# Altium footprint library E18系列-PcbLib.PcbLib: 4 footprints
Each footprint in its own frame and in the unit in brackets; x right, y up, seen from the top. Pads: shape width x height; smd on the part's side, far side on the other; paste and mask are expansions set on the pad; w line width, h text height; cw(c..) or ccw(c..) is an arc to the next point about the centre after c.
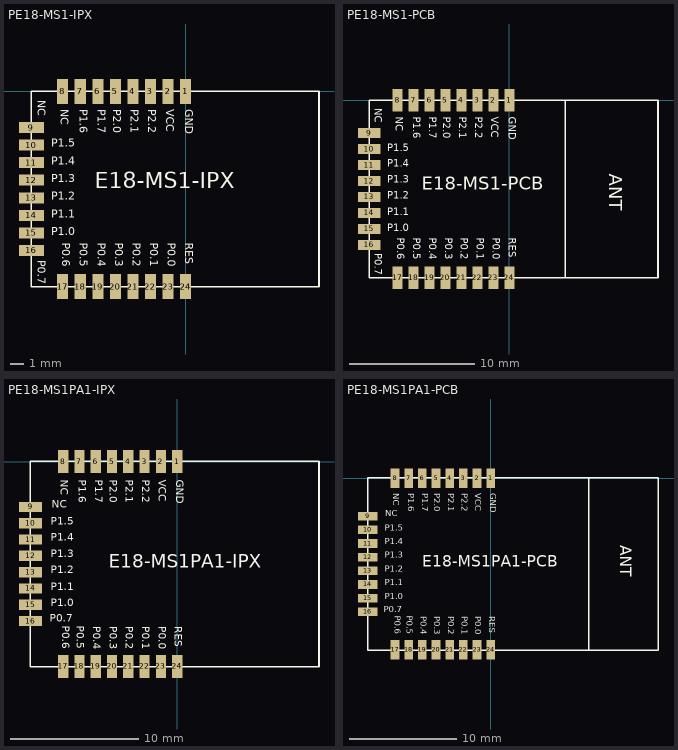
[diagram p0: the footprints below, top view; thin cyan lines are the x and y axes]

## PE18-MS1-IPX [mm] "20.8mm*14.1mm*2.40mm-S"
pads (24):
  rect 0.8x1.8 smd: 1(0,0) 2(-1.27,0) 3(-2.54,0) 4(-3.81,0) 5(-5.08,0) 6(-6.35,0) 7(-7.62,0) 8(-8.89,0) 17(-8.89,-14.114) 18(-7.62,-14.114) 19(-6.35,-14.114) 20(-5.08,-14.114) 21(-3.81,-14.114) 22(-2.54,-14.114) 23(-1.27,-14.114) 24(0,-14.114)
  rect 1.8x0.8 smd: 9(-11.146,-2.612) 10(-11.146,-3.882) 11(-11.146,-5.152) 12(-11.146,-6.422) 13(-11.146,-7.692) 14(-11.146,-8.962) 15(-11.146,-10.232) 16(-11.146,-11.502)
Top Overlay:
  lines w0.127: -11.158,-14.127 -11.158,0.013 9.642,0.013 9.642,-14.127 -11.158,-14.127
  text "E18-MS1-IPX" at -6.586,-7.396 h2
  text "GND" at -0.236,-1.3 h1
  text "VCC" at -1.633,-1.3 h1
  text "P2.2" at -2.903,-1.3 h1
  text "P2.1" at -4.173,-1.3 h1
  text "P2.0" at -5.443,-1.3 h1
  text "P1.7" at -6.586,-1.3 h1
  text "P1.6" at -7.856,-1.3 h1
  text "NC" at -10.922,-0.635 h1
  text "P0.6" at -9.126,-10.952 h1
  text "P0.5" at -7.856,-10.952 h1
  text "P0.4" at -6.586,-10.952 h1
  text "P0.3" at -5.316,-10.952 h1
  text "P0.2" at -4.046,-10.952 h1
  text "P0.1" at -2.776,-10.952 h1
  text "P0.0" at -1.506,-10.952 h1
  text "RES" at -0.236,-10.952 h1
  text "NC" at -9.253,-1.3 h1
  text "P1.5" at -9.723,-4.233 h1
  text "P1.4" at -9.723,-5.503 h1
  text "P1.3" at -9.723,-6.773 h1
  text "P1.2" at -9.723,-8.043 h1
  text "P1.1" at -9.723,-9.339 h1
  text "P1.0" at -9.723,-10.609 h1
  text "P0.7" at -10.922,-12.192 h1

## PE18-MS1-PCB [mm] "23mm*14.1mm*2.40mm-S"
pads (24):
  rect 0.8x1.8 smd: 1(0,0) 2(-1.27,0) 3(-2.54,0) 4(-3.81,0) 5(-5.08,0) 6(-6.35,0) 7(-7.62,0) 8(-8.89,0) 17(-8.89,-14.114) 18(-7.62,-14.114) 19(-6.35,-14.114) 20(-5.08,-14.114) 21(-3.81,-14.114) 22(-2.54,-14.114) 23(-1.27,-14.114) 24(0,-14.114)
  rect 1.8x0.8 smd: 9(-11.146,-2.612) 10(-11.146,-3.882) 11(-11.146,-5.152) 12(-11.146,-6.422) 13(-11.146,-7.692) 14(-11.146,-8.962) 15(-11.146,-10.232) 16(-11.146,-11.502)
Top Overlay:
  lines w0.127: 4.445,-14.127 4.445,0 ; 11.842,0 11.842,-14.127 -11.158,-14.127 -11.158,0.013 11.842,0.013
  text "E18-MS1-PCB" at -6.985,-7.493 h1.8
  text "GND" at -0.236,-1.3 h1
  text "VCC" at -1.633,-1.3 h1
  text "P2.2" at -2.903,-1.3 h1
  text "P2.1" at -4.173,-1.3 h1
  text "P2.0" at -5.443,-1.3 h1
  text "P1.7" at -6.586,-1.3 h1
  text "P1.6" at -7.856,-1.3 h1
  text "NC" at -10.922,-0.635 h1
  text "P0.6" at -9.126,-10.952 h1
  text "P0.5" at -7.856,-10.952 h1
  text "P0.4" at -6.586,-10.952 h1
  text "P0.3" at -5.316,-10.952 h1
  text "P0.2" at -4.046,-10.952 h1
  text "P0.1" at -2.776,-10.952 h1
  text "P0.0" at -1.506,-10.952 h1
  text "RES" at -0.236,-10.952 h1
  text "NC" at -9.253,-1.3 h1
  text "P1.5" at -9.723,-4.233 h1
  text "P1.4" at -9.723,-5.503 h1
  text "P1.3" at -9.723,-6.773 h1
  text "P1.2" at -9.723,-8.043 h1
  text "P1.1" at -9.723,-9.339 h1
  text "P1.0" at -9.723,-10.609 h1
  text "P0.7" at -10.922,-12.192 h1
  text "ANT" at 7.62,-5.842 h1.8

## PE18-MS1PA1-IPX [mm] "22.5mm*16mm*2.40mm-S"
pads (24):
  rect 0.8x1.8 smd: 1(0,0) 2(-1.27,0) 3(-2.54,0) 4(-3.81,0) 5(-5.08,0) 6(-6.35,0) 7(-7.62,0) 8(-8.89,0) 17(-8.89,-15.975) 18(-7.62,-15.975) 19(-6.35,-15.975) 20(-5.08,-15.975) 21(-3.81,-15.975) 22(-2.54,-15.975) 23(-1.27,-15.975) 24(0,-15.975)
  rect 1.8x0.8 smd: 9(-11.432,-3.542) 10(-11.432,-4.812) 11(-11.432,-6.082) 12(-11.432,-7.352) 13(-11.432,-8.622) 14(-11.432,-9.892) 15(-11.432,-11.162) 16(-11.432,-12.432)
Top Overlay:
  lines w0.127: -11.445,-15.987 -11.445,0.013 11.055,0.013 11.055,-15.987 -11.445,-15.987
  text "P0.7" at -9.921,-12.685 h1
  text "P1.0" at -9.865,-11.483 h1
  text "P1.1" at -9.865,-10.213 h1
  text "P1.2" at -9.865,-8.918 h1
  text "P1.3" at -9.865,-7.648 h1
  text "P1.4" at -9.865,-6.378 h1
  text "P1.5" at -9.865,-5.108 h1
  text "NC" at -9.268,-1.412 h1
  text "RES" at -0.378,-12.842 h1
  text "P0.0" at -1.648,-12.842 h1
  text "P0.1" at -2.918,-12.842 h1
  text "P0.2" at -4.188,-12.842 h1
  text "P0.3" at -5.458,-12.842 h1
  text "P0.4" at -6.728,-12.842 h1
  text "P0.5" at -8.016,-12.812 h1
  text "P0.6" at -9.159,-12.812 h1
  text "NC" at -9.794,-3.795 h1
  text "P1.6" at -7.871,-1.412 h1
  text "P1.7" at -6.601,-1.412 h1
  text "P2.0" at -5.458,-1.412 h1
  text "P2.1" at -4.188,-1.412 h1
  text "P2.2" at -2.918,-1.412 h1
  text "VCC" at -1.648,-1.412 h1
  text "GND" at -0.251,-1.412 h1
  text "E18-MS1PA1-IPX" at -5.349,-8.621 h1.8

## PE18-MS1PA1-PCB [mm] "27mm*16mm*2.40mm-S"
pads (24):
  rect 0.8x1.8 smd: 1(0,0) 2(-1.27,0) 3(-2.54,0) 4(-3.81,0) 5(-5.08,0) 6(-6.35,0) 7(-7.62,0) 8(-8.89,0) 17(-8.89,-15.975) 18(-7.62,-15.975) 19(-6.35,-15.975) 20(-5.08,-15.975) 21(-3.81,-15.975) 22(-2.54,-15.975) 23(-1.27,-15.975) 24(0,-15.975)
  rect 1.8x0.8 smd: 9(-11.432,-3.542) 10(-11.432,-4.812) 11(-11.432,-6.082) 12(-11.432,-7.352) 13(-11.432,-8.622) 14(-11.432,-9.892) 15(-11.432,-11.162) 16(-11.432,-12.432)
Top Overlay:
  lines w0.127: 9.115,-15.987 9.115,0.013 ; -11.445,-15.987 15.555,-15.987 15.555,0.013 -11.445,0.013 -11.445,-15.987
  text "E18-MS1PA1-PCB" at -6.35,-8.636 h1.8
  text "GND" at -0.251,-1.412 h1
  text "VCC" at -1.648,-1.412 h1
  text "P2.2" at -2.918,-1.412 h1
  text "P2.1" at -4.188,-1.412 h1
  text "P2.0" at -5.458,-1.412 h1
  text "P1.7" at -6.601,-1.412 h1
  text "P1.6" at -7.871,-1.412 h1
  text "NC" at -9.794,-3.795 h1
  text "P0.6" at -9.159,-12.812 h1
  text "P0.5" at -8.016,-12.812 h1
  text "P0.4" at -6.728,-12.842 h1
  text "P0.3" at -5.458,-12.842 h1
  text "P0.2" at -4.188,-12.842 h1
  text "P0.1" at -2.918,-12.842 h1
  text "P0.0" at -1.648,-12.842 h1
  text "RES" at -0.378,-12.842 h1
  text "NC" at -9.268,-1.412 h1
  text "P1.5" at -9.865,-5.108 h1
  text "P1.4" at -9.865,-6.378 h1
  text "P1.3" at -9.865,-7.648 h1
  text "P1.2" at -9.865,-8.918 h1
  text "P1.1" at -9.865,-10.213 h1
  text "P1.0" at -9.865,-11.483 h1
  text "P0.7" at -9.921,-12.685 h1
  text "ANT" at 11.684,-6.223 h1.8